# EAGLE library part 6210XX242921_621014242921 (library WR-PHD)
WR-PHD 2.00 mm Dual SMT Socket Header Bottom Entry Article Properties Pins 4 unitless; 6 unitless; 8 unitless; 10 unitless; 14 unitless; 16 unitless; 20 unitless; 24 unitless; 32 unitless; 44 unitless General Information Operating Temperature -40 °C up to +105 °C Compliance Lead free / RoHS Pitch 2 mm Durability 50 Cycles Rows Dual Gender Socket Header Type Straight Material Properties Insulator Material PA9T Insulator Flammability Rating UL94 V-0 Contact Material Copper Alloy Contact Plating Gold Contact Type Stamped Certification UL Approval E323964 Packaging Properties Packaging Tape and Reel with Cap; Tube Electrical Properties IR 2 A Withstanding Voltage 500 V (AC) Contact Resistance 20 mΩ RISO 1000 MΩ <https://www.we-online.com/components/media/o57956v209%20Family_Dual_Socket_Header_WR-PHD_6130xx242921.jpg> Details see: www.we-online.com/en/components/products/PHD_2_00_SMT_DUAL_SOCKET_HEADER_6210XX242921 <www.we-online.com/en/components/products/PHD_2_00_SMT_DUAL_SOCKET_HEADER_6210XX242921/?utm_source=eagle_model&utm_medium=description_link&utm_campaign=eisos_eagle> Updated by Ella 2024-01-31 2024 (C) Würth Elektronik
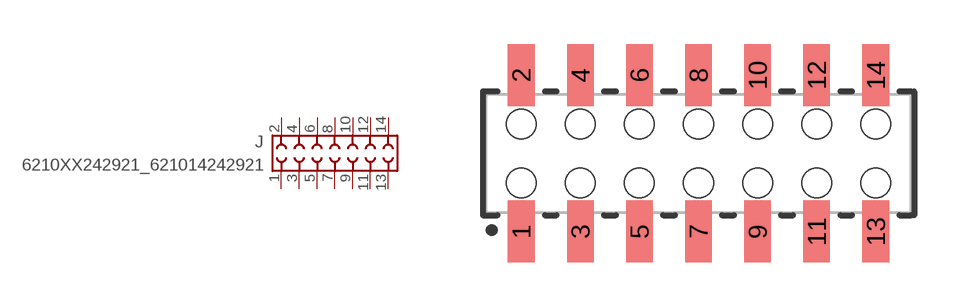
[diagram p364: symbol with the pads of 621014242921; footprint 621014242921]

Designator prefix J

## 6210XX242921_621014242921 (DATASHEET-URL: https://www.we-online.com/redexpert/spec/621014242921?ae; GENDER: Socket Header; IR: 2A; MOUNT: SMT; PACKAGING: Tube; PART-NUMBER: 621014242921; PINS: 14; PITCH: 2.00 mm; ROWS: Dual; TYPE: Straight; VALUE: 621014242921)  [621014242921]
1  1  pas
2  2  pas
3  3  pas
4  4  pas
5  5  pas
6  6  pas
7  7  pas
8  8  pas
9  9  pas
10  10  pas
11  11  pas
12  12  pas
13  13  pas
14  14  pas

## Footprint 621014242921 (pad centres in mm)
WR-PHD 2.00 mm Dual SMT Socket Header,14 Pins
smd 0.9 x 2.1: 1 -6,-2.65; 2 -6,2.65; 3 -4,-2.65; 4 -4,2.65; 5 -2,-2.65; 6 -2,2.65; 7 0,-2.65; 8 0,2.65; 9 2,-2.65; 10 2,2.65; 11 4,-2.65; 12 4,2.65; 13 6,-2.65; 14 6,2.65
hole 1 at -6,1
hole 1 at -4,1
hole 1 at -4,-1
hole 1 at -6,-1
hole 1 at -2,1
hole 1 at -2,-1
hole 1 at 0,-1
hole 1 at 0,1
hole 1 at 2,1
hole 1 at 2,-1
hole 1 at 4,-1
hole 1 at 6,-1
hole 1 at 6,1
hole 1 at 4,1